# Altium footprint library CC2538+332539.PcbLib: 3 footprints
Each footprint in its own frame and in the unit in brackets; x right, y up, seen from the top. Pads: shape width x height; smd on the part's side, far side on the other; paste and mask are expansions set on the pad; w line width, h text height; cw(c..) or ccw(c..) is an arc to the next point about the centre after c.
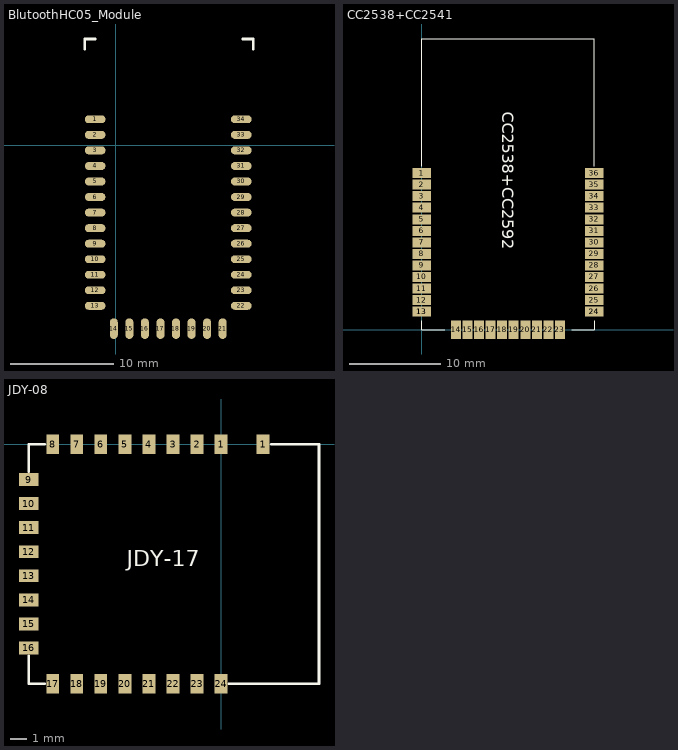
[diagram p0: the footprints below, top view; thin cyan lines are the x and y axes]

## BlutoothHC05_Module [mm]
pads (34):
  oval 2x0.76 smd: 1(-2,2.5) 2(-2,1) 3(-2,-0.5) 4(-2,-2) 5(-2,-3.5) 6(-2,-5) 7(-2,-6.5) 8(-2,-8) 9(-2,-9.5) 10(-2,-11) 11(-2,-12.5) 12(-2,-14) 13(-2,-15.5) 22(12.1,-15.5) 23(12.1,-14) 24(12.1,-12.5) 25(12.1,-11) 26(12.1,-9.5) 27(12.1,-8) 28(12.1,-6.5) 29(12.1,-5) 30(12.1,-3.5) 31(12.1,-2) 32(12.1,-0.5) 33(12.1,1) 34(12.1,2.5)
  oval 0.76x2 smd: 14(-0.2,-17.7) 15(1.3,-17.7) 16(2.8,-17.7) 17(4.3,-17.7) 18(5.8,-17.7) 19(7.3,-17.7) 20(8.8,-17.7) 21(10.3,-17.7)
Top Overlay:
  lines w0.254: -3,9.25 -3,10.25 -2,10.25 ; 12.25,10.25 13.25,10.25 13.25,9.25

## CC2538+CC2541 [mm]
height 0.127
pads (38):
  rect 2.032x1.1 smd mask+0.05: 1(0,17.24) 2(0,15.97) 3(0,14.7) 4(0,13.43) 5(0,12.16) 6(0,10.89) 7(0,9.62) 8(0,8.35) 9(0,7.08) 10(0,5.81) 11(0,4.54) 12(0,3.27) 13(0,2) 13(0,2) 24(19,2) 24(19,2) 25(19,3.27) 26(19,4.54) 27(19,5.81) 28(19,7.08) 29(19,8.35) 30(19,9.62) 31(19,10.89) 32(19,12.16) 33(19,13.43) 34(19,14.7) 35(19,15.97) 36(19,17.24)
  rect 1.1x2.032 smd mask+0.05: 14(3.78,0) 15(5.05,0) 16(6.32,0) 17(7.59,0) 18(8.86,0) 19(10.13,0) 20(11.4,0) 21(12.67,0) 22(13.94,0) 23(15.21,0)
Top Overlay:
  lines w0.127: 0,1 0,0 2.54,0 ; 0,18 0,32 19,32 19,18 ; 16.51,0 19,0 19,1
  text "CC2538+CC2592" at 8.89,24 h1.27

## JDY-08 [mm]
pads (25):
  rect 0.8x1.2 smd: 1(0,0) 1(2.615,0) 2(-1.5,0) 3(-3,0) 4(-4.5,0) 5(-6,0) 6(-7.5,0) 7(-9,0) 8(-10.5,0) 17(-10.5,-14.935) 18(-9,-14.935) 19(-7.5,-14.935) 20(-6,-14.935) 21(-4.5,-14.935) 22(-3,-14.935) 23(-1.5,-14.935) 24(0,-14.935)
  rect 1.2x0.8 smd: 9(-12,-2.202) 10(-12,-3.702) 11(-12,-5.202) 12(-12,-6.702) 13(-12,-8.202) 14(-12,-9.702) 15(-12,-11.202) 16(-12,-12.702)
Top Overlay:
  lines w0.16: -12,-13.176 -12,-14.935 -10.984,-14.935 ; -12,-1.702 -12,0 -10.984,0 ; 0.465,-14.935 6.1,-14.935 6.1,-1.905 6.1,0 3.124,0
  text "JDY-17" at -5.869,-7.604 h1